# Altium footprint library v2lib.PcbLib: 21 footprints (part 1 of 2)
Each footprint in its own frame and in the unit in brackets; x right, y up, seen from the top. Pads: shape width x height; smd on the part's side, far side on the other; paste and mask are expansions set on the pad; w line width, h text height; cw(c..) or ccw(c..) is an arc to the next point about the centre after c.
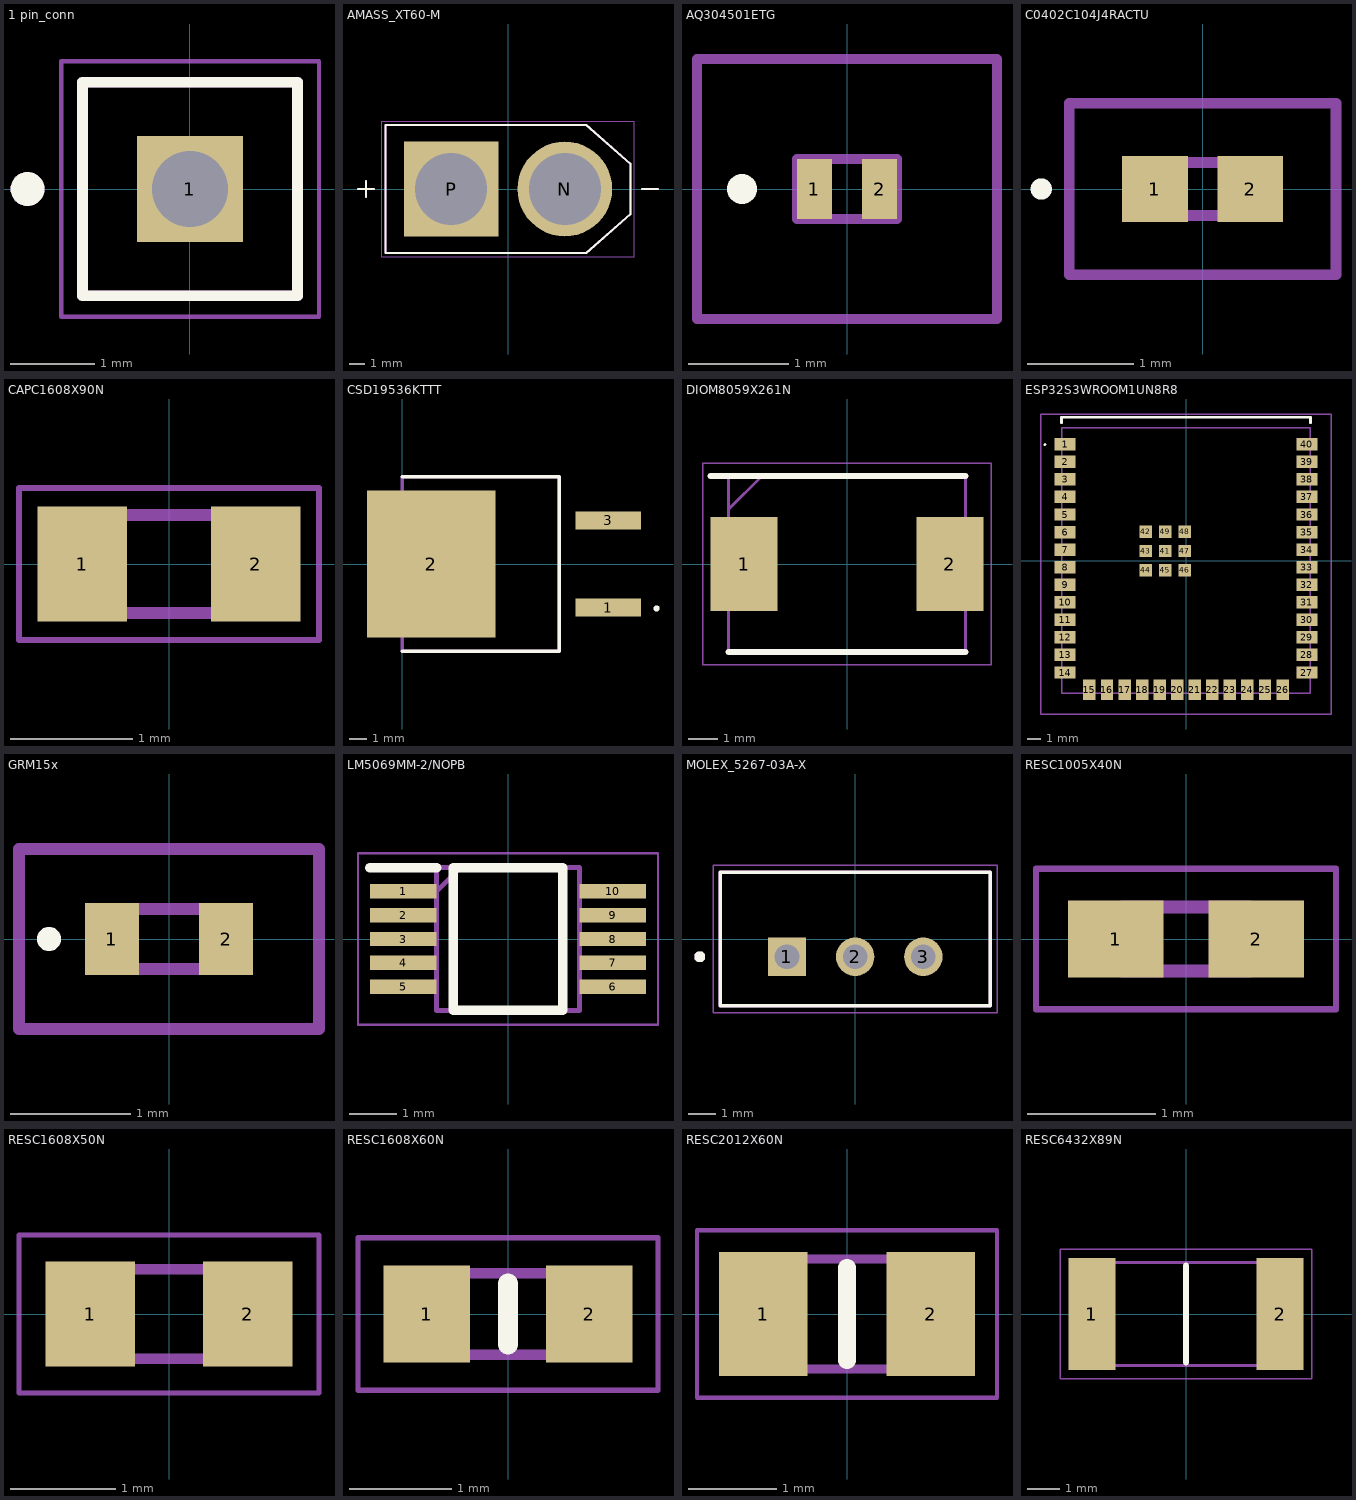
[diagram p0: the footprints below, top view; thin cyan lines are the x and y axes]

## 1 pin_conn [mm]
pads (1):
  rect 1.25x1.25 hole 0.9: 1(0,0)
Top Overlay:
  circle w0.2: c-1.92,0 r0.1
  lines w0.127: -1.27,-1.26 -1.27,1.26 1.27,1.26 1.27,-1.26 -1.27,-1.26
Top 3D Body:
  circle w0.2: c-1.92,0 r0.1
  lines w0.127: -1.27,-1.26 -1.27,1.26 1.27,1.26 1.27,-1.26 -1.27,-1.26
Top Courtyard:
  lines w0.05: -1.52,-1.51 -1.52,1.51 1.524,1.51 1.524,-1.51 -1.52,-1.51

## AMASS_XT60-M [mm]
height 16
pads (2):
  round 6 hole 4.55: N(3.6,0)
  rect 6x6 / inner round 6 / far side rect 6x6 hole 4.55: P(-3.6,0)
Top Overlay:
  lines w0.127: -9.5,0 -8.5,0 ; -9,-0.5 -9,0.5 ; 8.5,0 9.5,0 ; -7.75,-4.05 4.95,-4.05 7.75,-1.6 7.75,1.6 4.95,4.05 -7.75,4.05 -7.75,-4.05
Top 3D Body:
  lines w0.127: -9.5,0 -8.5,0 ; -9,-0.5 -9,0.5 ; 8.5,0 9.5,0 ; -7.75,-4.05 4.95,-4.05 7.75,-1.6 7.75,1.6 4.95,4.05 -7.75,4.05 -7.75,-4.05
Top Courtyard:
  lines w0.05: -8,-4.3 -8,4.3 8,4.3 8,-4.3 -8,-4.3
3D body "step_temp.STEP": height 16, standoff -4.5, extent -7.75,-4.05 7.75,4.05

## AQ304501ETG [mm]
pads (2):
  rect 0.35x0.6 smd: 1(-0.325,0) 2(0.325,0)
Top Overlay:
  lines w0.2: -1.1,0 cw(c-1.05,0) -1,0 ; -1.1,0 ccw(c-1.05,0) -1,0 ; -1.1,0 cw(c-1.05,0) -1,0
Mechanical 13:
  lines w0.1: -0.5,-0.3 0.5,-0.3 0.5,0.3 -0.5,0.3 -0.5,-0.3
Mechanical 15:
  lines w0.1: -1.5,-1.3 1.5,-1.3 1.5,1.3 -1.5,1.3 -1.5,-1.3
3D body "AQ3045-01ETG.stp": height 0.43, standoff 0, extent -0.535,-0.34 0.535,0.335

## C0402C104J4RACTU [mm]
pads (2):
  rect 0.62x0.62 smd: 1(-0.45,0) 2(0.45,0)
Top Overlay:
  lines w0.1: -1.524,-0.05 ccw(c-1.524,0) -1.524,0.05 ccw(c-1.524,0) -1.524,-0.05
Mechanical 13:
  lines w0.1: -0.5,-0.25 -0.5,0.25 0.5,0.25 0.5,-0.25 -0.5,-0.25
Mechanical 15:
  lines w0.1: -1.26,-0.81 -1.26,0.81 1.26,0.81 1.26,-0.81 -1.26,-0.81
3D body "C0402C101G3GALTU.stp": height 0, standoff 0, extent -0.52,-0.28 -0.52,-0.28

## CAPC1608X90N [mm]
pads (2):
  rect 0.73x0.94 smd: 1(-0.71,0) 2(0.71,0)
Mechanical 13:
  lines w0.1: -0.8,-0.4 0.8,-0.4 0.8,0.4 -0.8,0.4 -0.8,-0.4
Mechanical 15:
  lines w0.05: -1.225,-0.62 1.225,-0.62 1.225,0.62 -1.225,0.62 -1.225,-0.62
3D body "CL10A475KO8NNNC.stp": height 0.9, standoff 0, extent -0.8,-0.4 0.8,0.4

## CSD19536KTTT [mm]
pads (3):
  rect 3.82x1.05 smd: 1(12,-2.54) 3(12,2.54)
  rect 7.48x8.55 smd: 2(1.7,0)
Top Overlay:
  circle w0.2: c14.814,-2.587 r0.082
  lines w0.2: 0,-5.08 9.15,-5.08 9.15,5.08 0,5.08
Mechanical 13:
  lines w0.2: 0,-5.08 9.15,-5.08 9.15,5.08 0,5.08 0,-5.08
3D body "CSD19536KTT.stp": height 4.7, standoff 0.01, extent -1.775,-5.07 13.725,5.07

## DIOM8059X261N [mm]
pads (2):
  rect 2.25x3.15 smd: 1(-3.45,0) 2(3.45,0)
Top Overlay:
  lines w0.2: -4.575,2.95 3.975,2.95 ; -3.975,-2.95 3.975,-2.95
Mechanical 13:
  lines w0.1: -3.975,1.825 -2.85,2.95 ; -3.975,-2.95 3.975,-2.95 3.975,2.95 -3.975,2.95 -3.975,-2.95
Mechanical 15:
  lines w0.05: -4.825,-3.375 4.825,-3.375 4.825,3.375 -4.825,3.375 -4.825,-3.375
3D body "MBRS3100T3G.stp": height 2.61, standoff 0, extent -3.975,-2.95 3.975,2.95

## ESP32S3WROOM1UN8R8 [mm]
pads (49):
  rect 1.5x0.9 smd: 1(-8.75,8.41) 2(-8.75,7.14) 3(-8.75,5.87) 4(-8.75,4.6) 5(-8.75,3.33) 6(-8.75,2.06) 7(-8.75,0.79) 8(-8.75,-0.48) 9(-8.75,-1.75) 10(-8.75,-3.02) 11(-8.75,-4.29) 12(-8.75,-5.56) 13(-8.75,-6.83) 14(-8.75,-8.1) 27(8.75,-8.1) 28(8.75,-6.83) 29(8.75,-5.56) 30(8.75,-4.29) 31(8.75,-3.02) 32(8.75,-1.75) 33(8.75,-0.48) 34(8.75,0.79) 35(8.75,2.06) 36(8.75,3.33) 37(8.75,4.6) 38(8.75,5.87) 39(8.75,7.14) 40(8.75,8.41)
  rect 0.9x1.5 smd: 15(-6.985,-9.35) 16(-5.715,-9.35) 17(-4.445,-9.35) 18(-3.175,-9.35) 19(-1.905,-9.35) 20(-0.635,-9.35) 21(0.635,-9.35) 22(1.905,-9.35) 23(3.175,-9.35) 24(4.445,-9.35) 25(5.715,-9.35) 26(6.985,-9.35)
  rect 0.9x0.9 smd: 41(-1.5,0.69) 42(-2.9,2.09) 43(-2.9,0.69) 44(-2.9,-0.71) 45(-1.5,-0.71) 46(-0.1,-0.71) 47(-0.1,0.69) 48(-0.1,2.09) 49(-1.5,2.09)
Top Overlay:
  lines w0.1: -10.26,8.382 ccw(c-10.21,8.382) -10.16,8.382 ccw(c-10.21,8.382) -10.26,8.382
  lines w0.2: -9,9.962 -9,10.362 9,10.362 9,9.962
Mechanical 13:
  lines w0.1: -9,-9.6 9,-9.6 9,9.6 -9,9.6 -9,-9.6
Mechanical 15:
  lines w0.1: -10.5,-11.1 10.5,-11.1 10.5,10.6 -10.5,10.6 -10.5,-11.1
3D body "ESP32-S3-WROOM-1U-N8R8.stp": height 3.25, standoff 0.03, extent -9.01,-9.61 9.01,9.6

## GRM15x [mm]
pads (2):
  rect 0.45x0.6 smd: 1(-0.475,0) 2(0.475,0)
Top Overlay:
  lines w0.1: -1,-0.05 ccw(c-1,0) -1,0.05 ccw(c-1,0) -1,-0.05
Mechanical 13:
  lines w0.1: -0.5,-0.25 -0.5,0.25 0.5,0.25 0.5,-0.25 -0.5,-0.25
Mechanical 15:
  lines w0.1: -1.25,-0.75 -1.25,0.75 1.25,0.75 1.25,-0.75 -1.25,-0.75
3D body "GRM155R6YA105ME11D.stp": height 0.5, standoff 0, extent -0.5,-0.28 0.5,0.27

## LM5069MM-2/NOPB [mm]
pads (10):
  rect 1.4x0.3 smd: 1(-2.2,1) 2(-2.2,0.5) 3(-2.2,0) 4(-2.2,-0.5) 5(-2.2,-1) 6(2.2,-1) 7(2.2,-0.5) 8(2.2,0) 9(2.2,0.5) 10(2.2,1)
Top Overlay:
  lines w0.2: -2.9,1.5 -1.5,1.5 ; -1.15,-1.5 -1.15,1.5 1.15,1.5 1.15,-1.5 -1.15,-1.5
Mechanical 13:
  lines w0.1: -1.5,1 -1,1.5 ; -1.5,-1.5 -1.5,1.5 1.5,1.5 1.5,-1.5 -1.5,-1.5
Mechanical 15:
  lines w0.05: -3.15,-1.8 -3.15,1.8 3.15,1.8 3.15,-1.8 -3.15,-1.8
3D body "LM5069MM-2_NOPB.stp": height 1.1, standoff 0, extent -2.463,-1.5 2.463,1.5

## MOLEX_5267-03A-X [mm]
pads (3):
  rect 1.408x1.408 / inner round 1.408 / far side rect 1.408x1.408 hole 0.9: 1(-2.5,-0.65)
  round 1.408 hole 0.9: 2(0,-0.65) 3(2.5,-0.65)
Top Overlay:
  circle w0.2: c-5.7,-0.65 r0.1
  lines w0.127: -4.95,-2.45 -4.95,2.45 4.95,2.45 4.95,-2.45 -4.95,-2.45
Mechanical 13:
  circle w0.2: c-5.7,-0.65 r0.1
  lines w0.127: -4.95,-2.45 -4.95,2.45 4.95,2.45 4.95,-2.45 -4.95,-2.45
Mechanical 15:
  lines w0.05: -5.2,-2.7 -5.2,2.7 5.2,2.7 5.2,-2.7 -5.2,-2.7
3D body "5267-03A-X--3DModel-STEP-269445.STEP": height 5.81, standoff -3.59, extent -4.95,-2.45 4.95,2.45

## RESC1005X40N [mm]
pads (2):
  rect 0.75x0.6 smd: 1(-0.55,0) 2(0.55,0)
Mechanical 13:
  lines w0.1: -0.5,-0.25 -0.5,0.25 0.5,0.25 0.5,-0.25 -0.5,-0.25
Mechanical 15:
  lines w0.05: -1.175,-0.55 -1.175,0.55 1.175,0.55 1.175,-0.55 -1.175,-0.55
3D body "RC0402FR-0727RL.stp": height 0.4, standoff 0, extent -0.5,-0.25 0.5,0.25

## RESC1608X50N [mm]
pads (2):
  rect 0.85x1 smd: 1(-0.75,0) 2(0.75,0)
Mechanical 13:
  lines w0.1: -0.788,-0.425 -0.788,0.425 0.788,0.425 0.788,-0.425 -0.788,-0.425
Mechanical 15:
  lines w0.05: -1.425,-0.75 -1.425,0.75 1.425,0.75 1.425,-0.75 -1.425,-0.75
3D body "CRCW06030000Z0EC.stp": height 0.45, standoff 0, extent -0.77,-0.43 0.78,0.42

## RESC1608X60N [mm]
pads (2):
  rect 0.85x0.95 smd: 1(-0.8,0) 2(0.8,0)
Top Overlay:
  lines w0.2: 0,-0.3 0,0.3
Mechanical 13:
  lines w0.1: -0.8,-0.4 -0.8,0.4 0.8,0.4 0.8,-0.4 -0.8,-0.4
Mechanical 15:
  lines w0.05: -1.475,-0.75 -1.475,0.75 1.475,0.75 1.475,-0.75 -1.475,-0.75
3D body "MCWR06X5101FTL.stp": height 0.6, standoff 0, extent -0.8,-0.4 0.8,0.4

## RESC2012X60N [mm]
pads (2):
  rect 1x1.4 smd: 1(-0.95,0) 2(0.95,0)
Top Overlay:
  lines w0.2: 0,-0.525 0,0.525
Mechanical 13:
  lines w0.1: -1,-0.625 -1,0.625 1,0.625 1,-0.625 -1,-0.625
Mechanical 15:
  lines w0.05: -1.7,-0.95 -1.7,0.95 1.7,0.95 1.7,-0.95 -1.7,-0.95
3D body "CR0805-FX-4322ELF.stp": height 0, standoff 0, extent 0,0 0,0

## RESC6432X89N [mm]
pads (2):
  rect 1.45x3.45 smd: 1(-2.9,0) 2(2.9,0)
Top Overlay:
  lines w0.2: 0,-1.49 0,1.49
Mechanical 13:
  lines w0.1: -3.175,-1.59 -3.175,1.59 3.175,1.59 3.175,-1.59 -3.175,-1.59
Mechanical 15:
  lines w0.05: -3.875,-2 -3.875,2 3.875,2 3.875,-2 -3.875,-2
3D body "WSLP25122L500FEA.stp": height 0.64, standoff 0, extent -3.175,-1.59 3.175,1.59